# Altium integrated library Resistores_PTH.IntLib: 29 symbols
Pins are listed as number, name and electrical type; pins without a type are passive.

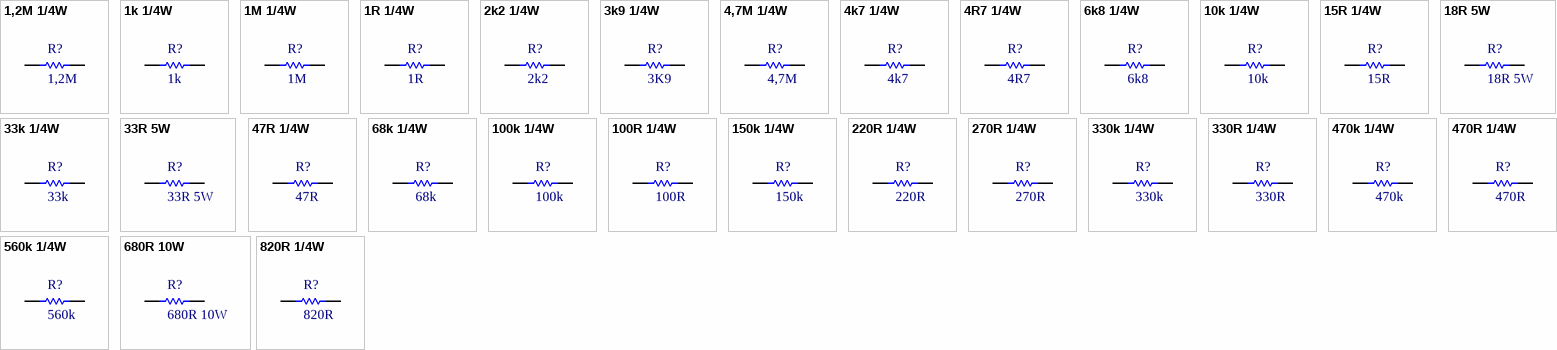
[diagram p0: symbols 1,2M 1/4W to 820R 1/4W]

## 1,2M 1/4W
designator R?, comment 1,2M
RESISTOR AXIAL 1,2M 1/4W +-5%
footprint 1.2M 1/4W RES-50
pins: 1, 2

## 1k 1/4W
designator R?, comment 1k
RESISTOR AXIAL 1kR 1/4W +-5%
footprint 1K 1/4W RES-50
footprint 1k 1/4W RES-40
pins: 1, 2

## 1M 1/4W
designator R?, comment 1M
RESISTOR AXIAL 1M 1/4W +-5%
footprint 1M 1/4W RES-50
pins: 1, 2

## 1R 1/4W
designator R?, comment 1R
RESISTOR AXIAL 1R 1/4W +-5%
footprint 1R 1/4W RES-50
footprint 1R 1/4W RES-40
pins: 1, 2

## 2k2 1/4W
designator R?, comment 2k2
RESISTOR AXIAL 2k2 1/4W +-5%
footprint 2k2 1/4W RES-40
pins: 1, 2

## 3k9 1/4W
designator R?, comment 3K9
RESISTOR AXIAL 3k9 1/4W +-5%
footprint 3k9 1/4W RES-40
pins: 1, 2

## 4,7M 1/4W
designator R?, comment 4,7M
RESISTOR AXIAL 4,7M 1/4W +-5%
footprint 4.7M 1/4W RES-50
pins: 1, 2

## 4k7 1/4W
designator R?, comment 4k7
RESISTOR AXIAL 4k7 1/4W +-5%
footprint 4k7 1/4W RES-50
pins: 1, 2

## 4R7 1/4W
designator R?, comment 4R7
RESISTOR AXIAL 4R7 1/4W +-5%
footprint 4R7 1/4W RES-50
pins: 1, 2

## 6k8 1/4W
designator R?, comment 6k8
RESISTOR AXIAL 6k8 1/4W +-5%
footprint 6K8 1/4W RES-50
pins: 1, 2

## 10k 1/4W
designator R?, comment 10k
RESISTOR AXIAL 10k 1/4W +-5%
footprint 10K 1/4W RES-50
pins: 1, 2

## 15R 1/4W
designator R?, comment 15R
RESISTOR AXIAL 15R 1/4W +-5%
footprint 15R 1/4W RES-40
pins: 1, 2

## 18R 5W
designator R?
RESISTOR AXIAL 18R 5W +-5%
footprint 18R 5W 24.5mm Lead
pins: 1, 2

## 33k 1/4W
designator R?, comment 33k
RESISTOR AXIAL 33k 1/4W +-5%
footprint 33K 1/4W RES-50
pins: 1, 2

## 33R 5W
designator R?
RESISTOR AXIAL 33R 5W 5%
footprint 33R 5W 24.5mm Lead
pins: 1, 2

## 47R 1/4W
designator R?, comment 47R
RESISTOR AXIAL 47R 1/4W +-5%
footprint 47R 1/4W RES-40
pins: 1, 2

## 68k 1/4W
designator R?, comment 68k
RESISTOR AXIAL 68k 1/4W +-5%
footprint 68K 1/4W RES-40
pins: 1, 2

## 100k 1/4W
designator R?, comment 100k
RESISTOR AXIAL 100k 1/4W +-5%
footprint 100K 1/4W RES-50
footprint 100k 1/4W RES-40
pins: 1, 2

## 100R 1/4W
designator R?, comment 100R
RESISTOR AXIAL 100R 1/4W +-5%
footprint 100R 1/4W RES-50
pins: 1, 2

## 150k 1/4W
designator R?, comment 150k
RESISTOR AXIAL 150k 1/4W +-5%
footprint 150K 1/4W RES-50
pins: 1, 2

## 220R 1/4W
designator R?, comment 220R
RESISTOR AXIAL 220R 1/4W +-5%
footprint 220R 1/4W RES-40
pins: 1, 2

## 270R 1/4W
designator R?, comment 270R
RESISTOR AXIAL 270R 1/4W +-5%
footprint 270R 1/4W RES-40
pins: 1, 2

## 330k 1/4W
designator R?, comment 330k
RESISTOR AXIAL 330k 1/4W +-5%
footprint 330K 1/4W RES-50
footprint 330K 1/4W RES-40
pins: 1, 2

## 330R 1/4W
designator R?, comment 330R
RESISTOR AXIAL 330R 1/4W +-5%
footprint 330R 1/4W RES-40
pins: 1, 2

## 470k 1/4W
designator R?, comment 470k
RESISTOR AXIAL 470k 1/4W +-5%
footprint 470K 1/4W RES-50
pins: 1, 2

## 470R 1/4W
designator R?, comment 470R
RESISTOR AXIAL 470R 1/4W +-5%
footprint 470R 1/4W RES-50
pins: 1, 2

## 560k 1/4W
designator R?, comment 560k
RESISTOR AXIAL 560k 1/4W +-5%
footprint 560K 1/4W RES-50
pins: 1, 2

## 680R 10W
designator R?
RESISTOR AXIAL 680R 10W +-5% 50mm lead
footprint 680R 10W 50mm LEAD
pins: 1, 2

## 820R 1/4W
designator R?, comment 820R
RESISTOR AXIAL 820R 1/4W +-5% .4 in lead
footprint 820R 1/4W RES-40
pins: 1, 2